# Altium footprint library Anten-Tracker.PcbLib: 36 footprints (part 3 of 3)
Each footprint in its own frame and in the unit in brackets; x right, y up, seen from the top. Pads: shape width x height; smd on the part's side, far side on the other; paste and mask are expansions set on the pad; w line width, h text height; cw(c..) or ccw(c..) is an arc to the next point about the centre after c.
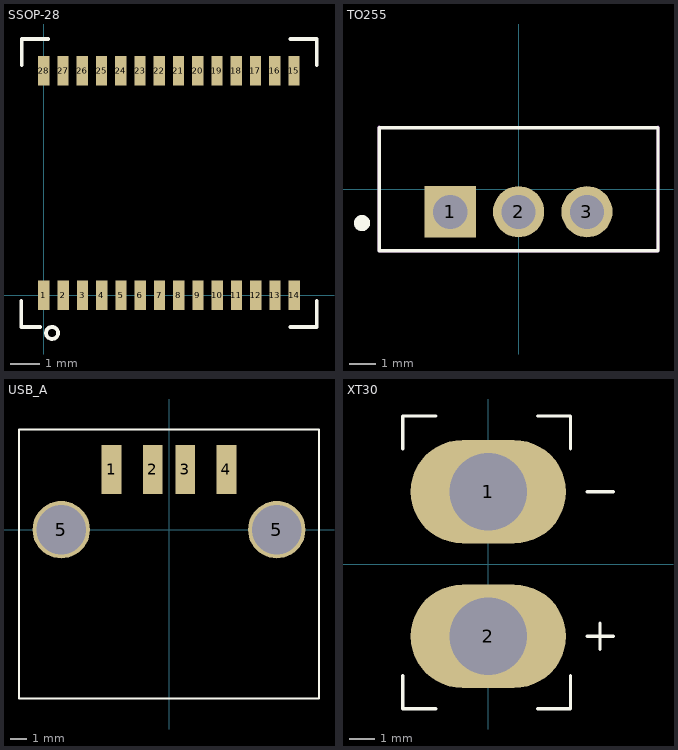
[diagram p2: the footprints below, top view; thin cyan lines are the x and y axes]

## SSOP-28 [mm]
pads (28):
  rect 0.38x1 smd paste-1 mask+0.508: 1(0,0) 2(0.658,0) 3(1.308,0) 4(1.958,0) 5(2.608,0) 6(3.258,0) 7(3.908,0) 8(4.558,0) 9(5.208,0) 10(5.858,0) 11(6.508,0) 12(7.158,0) 13(7.808,0) 14(8.458,0) 15(8.45,7.585) 16(7.8,7.585) 17(7.15,7.585) 18(6.5,7.585) 19(5.85,7.585) 20(5.2,7.585) 21(4.55,7.585) 22(3.9,7.585) 23(3.25,7.585) 24(2.6,7.585) 25(1.95,7.585) 26(1.3,7.585) 27(0.65,7.585) 28(0,7.585)
Top Overlay:
  circle w0.127: c0.279,-1.27 r0.204
  lines w0.127: -0.762,-0.178 -0.762,-1.067 -0.127,-1.067 ; -0.749,7.772 -0.749,8.661 0.14,8.661 ; 8.331,-1.067 9.22,-1.067 9.22,-0.178 ; 8.331,8.661 9.22,8.661 9.22,7.772
3D body "ssop28_model.STEP": height 1.96, standoff -0.04, extent -0.887,-0.11 9.313,7.69

## TO255 [mm]
height 19.68
pads (3):
  rect 1.91x1.91 / inner round 1.91 / far side rect 1.91x1.91 hole 1.27: 1(-2.55,-0.85)
  round 1.91 hole 1.27: 2(0,-0.85) 3(2.55,-0.85)
Top Overlay:
  circle w0.3: c-5.842,-1.27 r0.15
  lines w0.127: -5.2,-2.3 -5.2,2.286 5.2,2.286 5.2,-2.3 -5.2,-2.3
Mechanical 13:
  lines w0.127: -5.2,2.3 -5.2,-2.3 5.2,-2.3 5.2,2.3
3D body "step_temp.STEP": height 19.22, standoff -9.68, extent -5.08,-2.214 5.12,2.286

## USB_A [mm]
pads (6):
  rect 1.2x3 smd paste-1 mask+0.508: 1(-3.5,3.67) 2(-1,3.67) 3(1,3.67) 4(3.5,3.67)
  round 3.5 hole 3 paste-1 mask+0.508: 5(-6.57,0) 5(6.57,0)
Top Overlay:
  lines w0.127: -9.144,-10.28 0,-10.28 9.144,-10.28 9.144,6.096 -9.144,6.096 -9.144,-10.28
3D body "femaleThruHoleUSB.stp": height 7.55, standoff -3.58, extent -7.888,-10.207 7.888,4.238

## XT30 [mm]
pads (2):
  oval 6x4 hole 3 paste-1 mask+0.508: 1(0,2.794) 2(0,-2.794)
Top Overlay:
  lines w0.127: -3.302,-4.318 -3.302,-5.588 -2.032,-5.588 ; -3.302,4.445 -3.302,5.715 -2.032,5.715 ; 1.905,-5.588 3.175,-5.588 3.175,-4.318 ; 1.905,5.715 3.175,5.715 3.175,4.445 ; 3.81,-2.794 4.826,-2.794 4.318,-2.794 4.318,-3.048 4.318,-2.286 4.318,-3.302 ; 3.81,2.794 4.826,2.794
3D body "XT30-M_m.ver.STEP": height 12.9, standoff -3.6, extent -3.075,-5.429 3.025,5.571